# Altium schematic symbol library Schlib_PGS.SchLib: 1 symbol
Pins are listed as number, name and electrical type; pins without a type are passive.

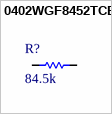
[diagram p0: symbol 0402WGF8452TCE]

## 0402WGF8452TCE
designator R?, comment 84.5k
62.5mW Thick Film Resistors 50V ±100ppm/℃ ±1% 84.5kΩ 0402 Chip Resistor - Surface Mount ROHS; Manufacturer: UNI-ROYAL(Uniroyal Elec); Manufacturer Part Number: 0402WGF8452TCE; Value: 84.5kR; Temperature Coefficient: 100ppm/°C; Supplier: LCSC; Supplier Part Number: C26988; RoHS: No; Item Type: Resistor; LCSC Part Number: C26988
footprint Res-0402
footprint Res-0402
pins: 1, 2